# Altium integrated library EKG.IntLib: 40 symbols
Pins are listed as number, name and electrical type; pins without a type are passive.

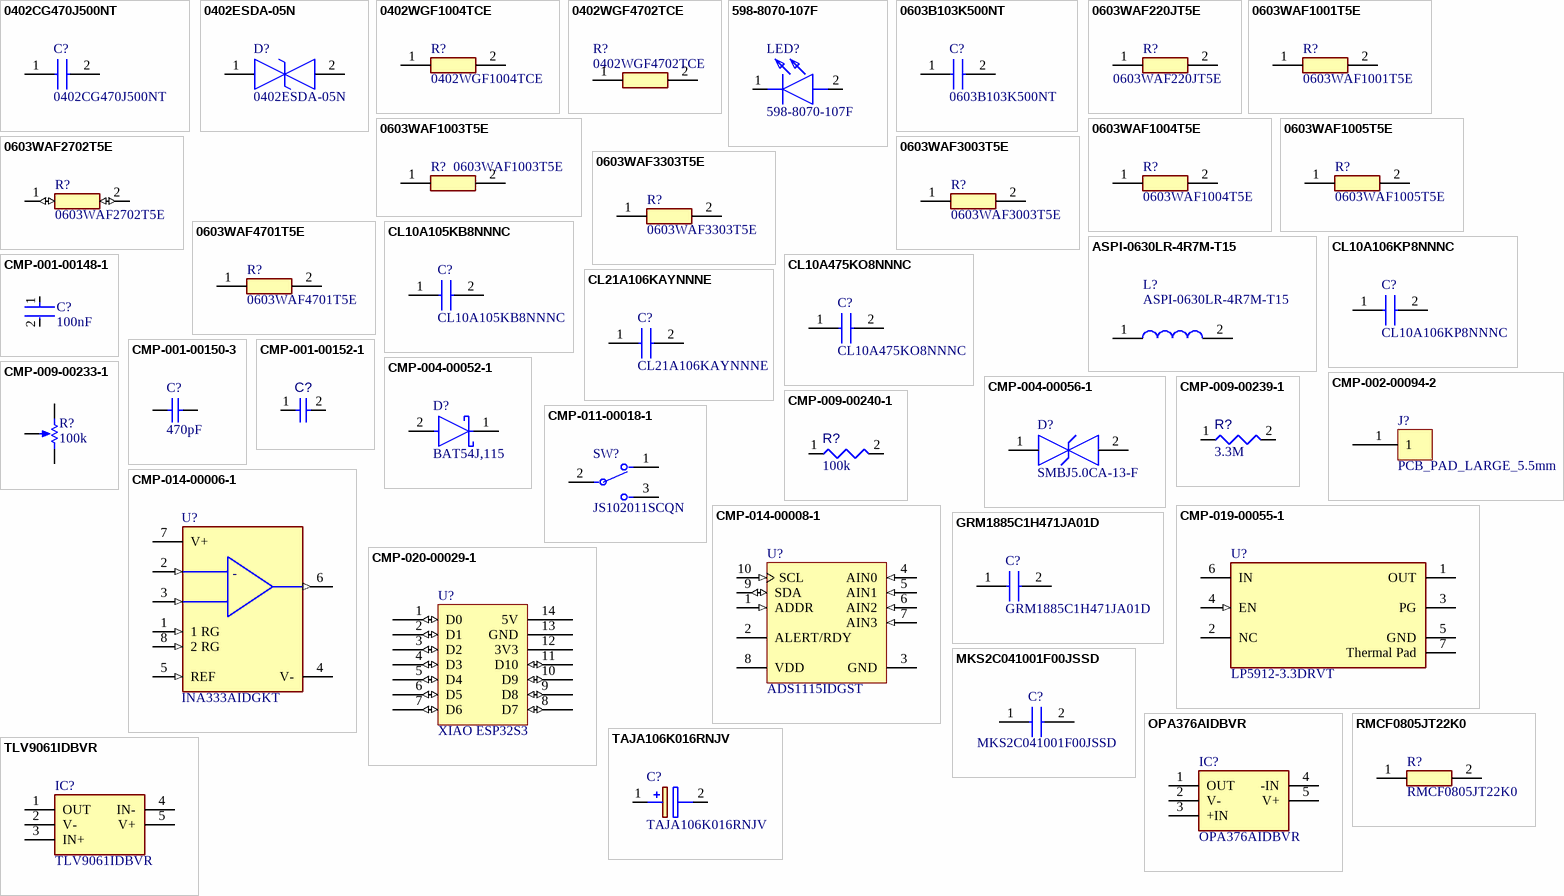
[diagram p0: symbols 0402CG470J500NT to TLV9061IDBVR]

## 0402CG470J500NT
designator C?
Capacitor; Manufacturer_Name: Guangdong Fenghua Advanced Tech; Datasheet Link: https://datasheet.lcsc.com/szlcsc/Guangdong-Fenghua-Advanced-Tech-0402CG470J500NT_C1567.pdf; Height: 0.55mm; Manufacturer_Part_Number: 0402CG470J500NT
footprint CAPC1005X55N
pins: 1, 2

## 0402ESDA-05N
designator D?
TVS Diode (Bi-directional); Manufacturer_Name: Bourne Semicon; Datasheet Link: https://datasheet.lcsc.com/szlcsc/1811061308_Bourne-Semicon-Shenzhen-0402ESDA-05N_C316049.pdf; Height: 0.6mm; Manufacturer_Part_Number: 0402ESDA-05N
footprint DIONC1005X60N
pins: 1, 2

## 0402WGF1004TCE
designator R?
Resistor; Manufacturer_Name: ROYALOHM; Datasheet Link: https://www.mouser.ca/datasheet/2/1365/1-3044649.pdf; Height: 0.4mm; Manufacturer_Part_Number: 0402WGF1004TCE; Mouser Part Number: 303-0402WGF1004TCE; Mouser Price/Stock: https://www.mouser.co.uk/ProductDetail/Royalohm/0402WGF1004TCE?qs=e8oIoAS2J1Sm8qYhjADD%252Bg%3D%3D
footprint RESC1005X40N
pins: 1, 2

## 0402WGF4702TCE
designator R?
Resistor; Manufacturer_Name: UNI-ROYAL(Uniroyal Elec); Datasheet Link: https://datasheet.lcsc.com/szlcsc/Uniroyal-Elec-0402WGF4702TCE_C25792.pdf; Height: 0.4mm; Manufacturer_Part_Number: 0402WGF4702TCE
footprint RESC1005X40N
pins: 1, 2

## 598-8070-107F
designator LED?
LED; Manufacturer_Name: Dialight; Datasheet Link: https://www.mouser.in/datasheet/2/109/Dialight_CBI_data_598_0603_Apr2018-2944350.pdf; Height: 0.8mm; Manufacturer_Part_Number: 598-8070-107F; Mouser Part Number: 645-598-8070-107F; Mouser Price/Stock: https://www.mouser.co.uk/ProductDetail/Dialight/598-8070-107F?qs=7JStj%2FjQ2SEP6f6GzqcocA%3D%3D; Arrow Part Number: 598-8070-107F; Arrow Price/Stock: https://www.arrow.com/en/products/598-8070-107f/dialight?region=nac
footprint 5988070107F
pins: 1 K, 2 A

## 0603B103K500NT
designator C?
Capacitor; Manufacturer_Name: Fenghua Advanced Technology (Holding) CO.; Datasheet Link: https://www.datasheets360.com/pdf/5043620394403009653; Height: 0.9mm; Manufacturer_Part_Number: 0603B103K500NT
footprint CAPC1608X90N
pins: 1, 2

## 0603WAF220JT5E
designator R?
Resistor; Manufacturer_Name: UNI-ROYAL(Uniroyal Elec); Datasheet Link: https://www.lcsc.com/datasheet/lcsc_datasheet_2206010100_UNI-ROYAL-Uniroyal-Elec-0603WAF220JT5E_C23345.pdf; Height: 0.55mm; Manufacturer_Part_Number: 0603WAF220JT5E
footprint RESC1608X55N
pins: 1, 2

## 0603WAF1001T5E
designator R?
Resistor; Manufacturer_Name: UNI-ROYAL(Uniroyal Elec); Datasheet Link: https://datasheet.lcsc.com/szlcsc/Uniroyal-Elec-0603WAF1001T5E_C21190.pdf; Height: 0.55mm; Manufacturer_Part_Number: 0603WAF1001T5E
footprint RESC1608X55N
pins: 1, 2

## 0603WAF1003T5E
designator R?
Resistor; Manufacturer_Name: UNI-ROYAL(Uniroyal Elec); Datasheet Link: https://datasheet.lcsc.com/szlcsc/Uniroyal-Elec-0603WAF1003T5E_C25803.pdf; Height: 0.55mm; Manufacturer_Part_Number: 0603WAF1003T5E
footprint RESC1608X55N
pins: 1, 2

## 0603WAF1004T5E
designator R?
Resistor; Manufacturer_Name: ROYALOHM; Datasheet Link: https://eu.mouser.com/datasheet/3/5925/1/1.pdf; Height: 0.55mm; Manufacturer_Part_Number: 0603WAF1004T5E; Mouser Part Number: 303-0603WAF1004T5E; Mouser Price/Stock: https://www.mouser.co.uk/ProductDetail/Royalohm/0603WAF1004T5E?qs=e8oIoAS2J1ROidUp2W57ZQ%3D%3D
footprint RESC1608X55N
pins: 1, 2

## 0603WAF1005T5E
designator R?
Resistor; Manufacturer_Name: ROYALOHM; Datasheet Link: https://eu.mouser.com/datasheet/3/5925/1/1.pdf; Height: 0.55mm; Manufacturer_Part_Number: 0603WAF1005T5E; Mouser Part Number: 303-0603WAF1005T5E; Mouser Price/Stock: https://www.mouser.co.uk/ProductDetail/Royalohm/0603WAF1005T5E?qs=e8oIoAS2J1TtIpBlPWLC5w%3D%3D
footprint RESC1608X55N
pins: 1, 2

## 0603WAF2702T5E
designator R?
Resistor; Manufacturer_Name: UNI-ROYAL(Uniroyal Elec); Datasheet Link: https://datasheet.lcsc.com/lcsc/2110252130_UNI-ROYAL-Uniroyal-Elec-0603WAF2702T5E_C22967.pdf; Height: 0.55mm; Manufacturer_Part_Number: 0603WAF2702T5E
footprint RESC1608X55N
pins: 1 (io), 2 (io)

## 0603WAF3003T5E
designator R?
Resistor; Manufacturer_Name: ROYALOHM; Datasheet Link: https://www.mouser.de/datasheet/2/1365/1-3044649.pdf; Height: 0.55mm; Manufacturer_Part_Number: 0603WAF3003T5E
footprint RESC1608X55N
pins: 1, 2

## 0603WAF3303T5E
designator R?
Resistor; Manufacturer_Name: Uniroyal Elec; Datasheet Link: https://datasheet.lcsc.com/szlcsc/Uniroyal-Elec-0603WAF3303T5E_C23137.pdf; Height: 0.55mm; Manufacturer_Part_Number: 0603WAF3303T5E
footprint RESC1608X55N
pins: 1, 2

## 0603WAF4701T5E
designator R?
Resistor; Manufacturer_Name: UNI-ROYAL(Uniroyal Elec); Datasheet Link: https://datasheet.lcsc.com/szlcsc/Uniroyal-Elec-0603WAF4701T5E_C23162.pdf; Height: 0.55mm; Manufacturer_Part_Number: 0603WAF4701T5E
footprint RESC1608X55N
pins: 1, 2

## ASPI-0630LR-4R7M-T15
designator L?
Inductor; Manufacturer_Name: ABRACON; Datasheet Link: https://abracon.com/Magnetics/power/ASPI-0630LR.pdf; Manufacturer_Part_Number: ASPI-0630LR-4R7M-T15; Mouser Part Number: 815-ASPI0630LR4R7T15; Mouser Price/Stock: https://www.mouser.co.uk/ProductDetail/ABRACON/ASPI-0630LR-4R7M-T15?qs=bWAYEm3xoCYVuRmkzS1c6A%3D%3D; Arrow Part Number: ASPI-0630LR-4R7M-T15; Arrow Price/Stock: https://www.arrow.com/en/products/aspi-0630lr-4r7m-t15/abracon?utm_currency=USD&region=nac
footprint ASPI-0630LR
pins: 1, 2

## CL10A105KB8NNNC
designator C?
Capacitor; Manufacturer_Name: SAMSUNG; Datasheet Link: https://datasheet.datasheetarchive.com/originals/distributors/Datasheets-DGA10/2411562.pdf; Height: 0.9mm; Manufacturer_Part_Number: CL10A105KB8NNNC; Mouser Part Number: 187-CL10A105KB8NNNC; Mouser Price/Stock: https://www.mouser.co.uk/ProductDetail/Samsung-Electro-Mechanics/CL10A105KB8NNNC?qs=ktYoCbbtCSJz4pFCLWXd5g%3D%3D; Arrow Part Number: CL10A105KB8NNNC; Arrow Price/Stock: https://www.arrow.com/en/products/cl10a105kb8nnnc/samsung-electro-mechanics.html?utm_currency=USD&region=nac
footprint CAPC1608X90N
pins: 1, 2

## CL10A106KP8NNNC
designator C?
Capacitor; Manufacturer_Name: SAMSUNG; Datasheet Link: https://datasheet.datasheetarchive.com/originals/distributors/Datasheets-DGA10/2415998.pdf; Height: 0.9mm; Manufacturer_Part_Number: CL10A106KP8NNNC; Mouser Part Number: 187-CL10A106KP8NNNC; Mouser Price/Stock: https://www.mouser.co.uk/ProductDetail/Samsung-Electro-Mechanics/CL10A106KP8NNNC?qs=X6jEic%2FHinAlyfRHj7fKwg%3D%3D; Arrow Part Number: CL10A106KP8NNNC; Arrow Price/Stock: https://www.arrow.com/en/products/cl10a106kp8nnnc/samsung-electro-mechanics.html?utm_currency=USD&region=europe
footprint CAPC1608X90N
pins: 1, 2

## CL10A475KO8NNNC
designator C?
Capacitor; Manufacturer_Name: SAMSUNG; Datasheet Link: https://rs.componentsearchengine.com/Datasheets/2/CL10A475KO8NNNC.pdf; Height: 0.9mm; Manufacturer_Part_Number: CL10A475KO8NNNC; Mouser Part Number: 187-CL10A475KO8NNNC; Mouser Price/Stock: https://www.mouser.co.uk/ProductDetail/Samsung-Electro-Mechanics/CL10A475KO8NNNC?qs=X6jEic%2FHinAbIjmLnFfqqQ%3D%3D; Arrow Part Number: CL10A475KO8NNNC; Arrow Price/Stock: https://www.arrow.com/en/products/cl10a475ko8nnnc/samsung-electro-mechanics.html?utm_currency=USD&region=nac
footprint CAPC1608X90N
pins: 1, 2

## CL21A106KAYNNNE
designator C?
Capacitor; Manufacturer_Name: SAMSUNG; Datasheet Link: https://datasheet.datasheetarchive.com/originals/distributors/Datasheets_SAMA/6a45835c9b7400e9b49c55c38a8ff4a2.pdf; Height: 1.45mm; Manufacturer_Part_Number: CL21A106KAYNNNE; Mouser Part Number: 187-CL21A106KAYNNNE; Mouser Price/Stock: https://www.mouser.co.uk/ProductDetail/Samsung-Electro-Mechanics/CL21A106KAYNNNE?qs=yOVawPpwOwmTXAd4dJtNjA%3D%3D; Arrow Part Number: CL21A106KAYNNNE; Arrow Price/Stock: https://www.arrow.com/en/products/cl21a106kaynnne/samsung-electro-mechanics.html?utm_currency=USD&region=nac
footprint CAPC2012X145N
pins: 1, 2

## CMP-001-00148-1
designator C?, comment value 100nF  (hidden comment: CC0603KRX7R9BB104)
Multilayer Ceramic Capacitor, CC Series, 0.1 - F, - 10%, X7R, 50 V, 0603 [1608 Metric]; Manufacturer: Yageo Group; Voltage Rating: 50V; Mounting Technology: Surface Mount; Tolerance: 10%; Case/Package: 0603; Max Operating Temperature: 125°C; Min Operating Temperature: -55°C; Pins: 2; Lead Free: Lead Free; Case Code (Metric): 1608; Width: 800µm; Termination: SMD/SMT; Depth: 800µm; RoHS: Compliant; Material: Ceramic; Dielectric: X7R; Schedule B: 8532240020, 8532240020; Country of Origin: Mainland China, Taiwan; Lifecycle Status: Production; Radiation Hardening: No; Case Code (Imperial): 0603; Height: 800µm; Number of Terminals: 2; China RoHS: Compliant; Voltage Rating (DC): 50V; Export Control Classification Number (ECCN) Code: EAR99; Halogen Free: Halogen Free; Thickness: 889µm; Voltage: 50V; Length: 1.6mm; Harmonized Tariff Schedule (HTS) Code: 8532.24.00.20; REACH SVHC: Unaffected; Introduction Date: 2005-08-18; Dielectric Material: Ceramic; Manufacturer Part Number: CC0603KRX7R9BB104; Component Type: Capacitors
footprint FP-CC0603-DA-IPC_B
footprint FP-CC0603-DA-IPC_C
footprint FP-CC0603-DA-MFG
footprint FP-CC0603-DA-IPC_A
pins: 1, 2

## CMP-001-00150-3
designator C?, comment value 470pF  (hidden comment: 0402B471K500NT)
50V 470pF X7R ±10% 0402 Multilayer Ceramic Capacitors MLCC - SMD/SMT ROHS; Manufacturer: Fenghua Electronics; Voltage Rating (DC): 50V; Mounting Technology: Surface Mount; Max Operating Temperature: 125°C; Lifecycle Status: Production; RoHS: Compliant; Dielectric Material: Ceramic; Length: 1mm; Width: 500µm; Case/Package: 0402; Height: 500µm; Number of Terminals: 2; REACH SVHC: Unaffected; Min Operating Temperature: -55°C; Manufacturer Part Number: 0402B471K500NT; Component Type: Capacitors
footprint Copy of KGM05DR50J226MH (Multilayer Ceramic Capacitors MLCC - SMD/SMT 6.3V 22uF X5R 0402 2 0%)
pins: 1, 2
1 alternate drawing of the same symbol

## CMP-001-00152-1
designator C?, comment TCC0402COG220J500AT  (value not drawn)
50V 22pF C0G ±5% 0402 Multilayer Ceramic Capacitors MLCC - SMD/SMT ROHS; Manufacturer: CCTC; Manufacturer Part Number: TCC0402COG220J500AT; Component Type: Capacitors
footprint TCC0402COG220J500AT (Multilayer Ceramic Capacitors MLCC - SMD/SMT 6.3V 22uF X5R 0402 2 0%)
pins: 1, 2

## CMP-002-00094-2
designator J?, comment PCB_PAD_LARGE_5.5mm
Large PCB pad; Component Type: Connectors
footprint PCB_MOTOR_PAD-Footprint-1
pins: 1

## CMP-004-00052-1
designator D?, comment BAT54J,115
BAT54 Series 30 V 0.2 A Surfacec Mount Schottky Diode - SOD-323F; Manufacturer Lifecycle Status: RELEASED FOR SUPPLY; Manufacturer: Nexperia; Max Reverse Voltage (DC): 30V; Max Output current: 200mA; Max Power Dissipation: 550mW; Forward Voltage: 240mV; Peak Non-Repetitive Surge Current: 600mA; Element Configuration: Single; Reverse Standoff Voltage: 25V; Value: 10pF; Max Junction Temperature (Tj): 150°C; Max Reverse Leakage Current: 2µA; Number of Elements: 1; RoHS: Compliant; Lead Free: Lead Free; Export Control Classification Number (ECCN) Code: EAR99; Forward Current: 200mA; Height: 800µm; REACH SVHC: Yes; Reverse Voltage: 30V; Max Repetitive Reverse Voltage (Vrrm): 30V; Radiation Hardening: No; Pins: 2; Max Surge Current: 600mA; Schedule B: 8541100070, 8541100070; Contact Plating: Tin; Mounting Technology: Surface Mount; Harmonized Tariff Schedule (HTS) Code: 8541.10.00.70; Peak Reverse Current: 2µA; Lifecycle Status: Production; China RoHS: Compliant; Average Rectified Current: 200mA; Ambient Temperature Range High: 150°C; Number of Terminals: 2; Max Operating Temperature: 150°C; Max Forward Surge Current (Ifsm): 600mA; Introduction Date: 2007-03-09; Country of Origin: Mainland China, Malaysia; Min Operating Temperature: -65°C; Manufacturer Part Number: BAT54J,115; Component Type: Diodes
footprint FP-SOD323F-MFG
pins: 1 C, 2 A

## CMP-004-00056-1
designator D?, comment SMBJ5.0CA-13-F
SMBJ5.0CA Series 600 W 5.0 V Surface Mount Bi-Directional TVS Diode - DO-214AA; Manufacturer: Diodes Inc.; Max Breakdown Voltage: 7.23V; Test Current: 10mA; Number of Channels: 1; Reverse Breakdown Voltage: 6.4V; Power Dissipation: 600W; Voltage Rating (DC): 5V; Breakdown Voltage: 6.8V; Max Output current: 65.2A; Clamping Voltage: 9.2V; Polarity: Bidirectional; Max Junction Temperature (Tj): 150°C; Max Reverse Leakage Current: 1.6mA; Value: 1nF; Max Power Dissipation: 5W; Element Configuration: Single; Schedule B: 8541100050, 8541100050; Packaging: Cut Tape; Mounting Technology: Surface Mount; Min Breakdown Voltage: 6.4V; Number of Elements: 1; Width: 3.9mm; Max Surge Current: 65.2A; Height: 2.5mm; Radiation Hardening: No; Length: 4.57mm; Pins: 2; RoHS: Compliant; Peak Pulse Power: 600W; Min Operating Temperature: -55°C; Case/Package: SMB; Number of Terminals: 2; Max Operating Temperature: 150°C; China RoHS: Non-Compliant; Leakage Current: 1.6mA; Reverse Standoff Voltage: 5V; Peak Pulse Current: 65.2A; REACH SVHC: Affected; Lead Free: Contains Lead; Termination: SMD/SMT; Lifecycle Status: Production; Direction: Bidirectional; Power Rating: 600W; Working Voltage: 5V; Manufacturer Part Number: SMBJ5.0CA-13-F; Component Type: Diodes
footprint FP-SMB-CA-MFG
pins: 1, 2

## CMP-009-00233-1
designator R?, comment value 100k  (hidden comment: 3266W-1-104LF)
Trimmer, Cermet, Rest 100 Kilohms, Pcb, Pwr-rtg 0.25W, Dim 0.264INLX0.177INWX0.285INH; Manufacturer: Bourns; Insulation Resistance: 1GΩ; Lead Length: 4.88mm; Lead Diameter: 460µm; Voltage Rating: 300V; Max Power Dissipation: 250mW; Pitch: 2.54mm; Number of Turns: 12; Tolerance: 10%; Temperature Coefficient: 100ppm/°C; Composition: Cermet; Number of Terminals: 3; Military Standard: Not; REACH SVHC: Affected; Thickness: 5.59mm; Taper: Linear; Max Operating Temperature: 125°C; Contact Plating: Tin; Depth: 4.5mm; RoHS: Compliant; Min Operating Temperature: -55°C; Pins: 3; Termination: Pin; Height: 7.24mm; Schedule B: 8533400080, 8533400080; Working Voltage: 300V; Voltage Rating (AC): 300V; Voltage Rating (DC): 300V; Width: 4.5mm; Radiation Hardening: No; Lifecycle Status: Production; Weight: 425.242847mg; Type: Potentiometer; Color: Blue; Length: 6.71mm; Power Rating: 250mW; Manufacturer Part Number: 3266W-1-104LF; Component Type: Resistors
footprint BOUR-3266W-3_V (THD, 3-Leads, Body 6.6x4.69mm, Pitch 2.54mm)
pins: 1 CCW, 2 WIPER, 3 CW

## CMP-009-00239-1
designator R?, comment value 3.3M  (hidden comment: 0603WAF3304T5E)
Res Thick Film 0603 3.3M Ohm 1% 0.1W(1/10W) ±100ppm/C Pad SMD T/R; Manufacturer: Royal Ohm; Working Voltage: 75V; Power Rating: 100mW; Temperature Coefficient: 100ppm/°C; Lifecycle Status: Production; REACH SVHC: Unaffected; Case/Package: 0603; Number of Terminals: 2; Mounting Technology: Surface Mount; Width: 800µm; RoHS: Compliant; China RoHS: Non-Compliant; Length: 1.6mm; Tolerance: 1%; Max Operating Temperature: 155°C; Height: 450µm; Min Operating Temperature: -55°C; Manufacturer Part Number: 0603WAF3304T5E; Component Type: Resistors
footprint 0603WAF3304T5E
pins: 1, 2
1 alternate drawing of the same symbol

## CMP-009-00240-1
designator R?, comment value 100k  (hidden comment: 0603WAF1003T5E)
Fixed Resistor, Metal Glaze/Thick Film, 0.1W, 100000ohm, 75V, 1% +/-Tol, Surface Mount, 0603; Manufacturer: Uniroyal; Power Rating: 100mW; Working Voltage: 50V; Temperature Coefficient: 100ppm/°C; Harmonized Tariff Schedule (HTS) Code: 8533.21.00.30; REACH SVHC: Unaffected; Height: 450µm; Lifecycle Status: Production; RoHS: Compliant; Length: 1.6mm; Mounting Technology: Surface Mount; Tolerance: 1%; Width: 800µm; Case/Package: 0603; Min Operating Temperature: -55°C; Max Operating Temperature: 155°C; Export Control Classification Number (ECCN) Code: EAR99; Number of Terminals: 2; Manufacturer Part Number: 0603WAF1003T5E; Component Type: Resistors
footprint 0603WAF3304T5E
pins: 1, 2
1 alternate drawing of the same symbol

## CMP-011-00018-1
designator SW?, comment JS102011SCQN
Slide Switch, 2 Positions, SPDT, Latched, 0.3A, 6VDC, Solder Terminal, Surface Mount-straight; Manufacturer: C&K Components; Contact Resistance: 70mΩ; Number of Positions: 1; Actuator Length: 2.0066mm; Switch Travel: 2mm; Electrical Life: 5kcycles; Current Rating: 300mA; Actuator Material: Nylon; Switch Function: On-On; Insulation Resistance: 100MΩ; Voltage Rating (DC): 6V; Min Operating Temperature: -40°C; Radiation Hardening: No; Orientation: Straight; Throw Configuration: SPDT; Introduction Date: 2009-12-16; Housing Material: Nylon; Length: 8.5mm; Harmonized Tariff Schedule (HTS) Code: 8536.50.90.50; Country of Origin: Mainland China; Color: Black; Export Control Classification Number (ECCN) Code: EAR99; REACH SVHC: Unaffected; Case/Package: SMD/SMT; Contact Current Rating: 300mA; Contact Plating: Silver; Life (Cycles): 5kcycles; Packaging: Tape and Reel; Mounting Technology: Surface Mount; Termination: Solder; RoHS: Compliant; Max Current Rating: 300mA; Height: 3.5mm; Terminal Material: Brass; Max Voltage Rating (DC): 6V; Max Operating Temperature: 85°C; Lifecycle Status: Production; Depth: 7.5mm; Manufacturer Part Number: JS102011SCQN; Component Type: Switches
footprint FP-JS102011SCQN-MFG
pins: 1, 2 C, 3

## CMP-014-00006-1
designator U?, comment INA333AIDGKT
IC INST AMP 1 CIRCUIT 8VSSOP Instrumentation Amplifier 1 Circuit Rail-to-Rail 8-VSSOP; Manufacturer Lifecycle Status: ACTIVE; Manufacturer: Texas Instruments; Number of Amplifiers: 1; Operating Supply Current: 50µA; Max Junction Temperature (Tj): 150°C; Common Mode Rejection Ratio: 100dB; Max Dual Supply Voltage: 2.75V; Min Supply Voltage: 1.8V; Max Supply Voltage: 5.5V; Min Dual Supply Voltage: 900mV; Input Offset Voltage (Vos): 25µV; Output Current per Channel: 40mA; Gain Bandwidth Product: 150kHz; Max Supply Current: 75µA; Value: 100GΩ; Power Supply Rejection Ratio (PSRR): 120dB; Number of Elements: 3; Input Bias Current: 70pA; Slew Rate: 0.16V/µs; Voltage Gain: 60dB; Thickness: 970µm; Width: 3mm; Number of Circuits: 1; Quiescent Current: 50µA; Lead Free: Lead Free; Height: 0m; Max Operating Temperature: 125°C; REACH SVHC: Unaffected; Schedule B: 8542330000, 8542330000; Radiation Hardening: No; Length: 3mm; RoHS: Compliant; Number of Channels: 1; -3db Bandwidth: 150kHz; Nominal Supply Current: 50µA; Case/Package: VSSOP; Ambient Temperature Range High: 125°C; Bandwidth: 150kHz; Lifecycle Status: Production; Pins: 8; Min Operating Temperature: -40°C; Weight: 26.506804mg; Manufacturer Part Number: INA333AIDGKT; Component Type: Amplifiers
footprint FP-DGK0008A-IPC_B
footprint FP-DGK0008A-IPC_A
footprint FP-DGK0008A-IPC_C
footprint FP-DGK0008A-MFG
pins: 1 1 RG (in), 2 VIN- (in), 3 VIN+ (in), 4 V- (power), 5 REF (in), 6 VOUT (out), 7 V+ (power), 8 2 RG (in)
text: -

## CMP-014-00008-1
designator U?, comment ADS1115IDGST
4-Channel Single ADC Delta-Sigma 860sps 16-bit Serial 10-Pin VSSOP T/R; Manufacturer Lifecycle Status: ACTIVE; Manufacturer: Texas Instruments; Min Supply Voltage: 2V; Resolution: 2B; Number of A/D Converters: 1; Max Power Dissipation: 500µW; Nominal Supply Current: 150µA; Polarity: Bipolar; Max Supply Voltage: 5.5V; Interface: I2C; Power Dissipation: 900µW; Number of Bits: 16; Number of Channels: 4; Operating Supply Voltage: 3.3V; Integral Nonlinearity (INL): 1LSB; Termination: SMD/SMT; Case/Package: VSSOP; Width: 3mm; Contact Plating: Gold; REACH SVHC: No; Pins: 10; Number of Converters: 1; Max Operating Temperature: 125°C; Thickness: 1.02mm; Lead Free: Lead Free; Number of Elements: 1; Height: 1.07mm; Min Supply Voltage (DC): 2V; Lifecycle Status: Production; RoHS: Compliant; Conversion Rate: 860sps; Schedule B: 8542390000, 8542390000; Radiation Hardening: No; Supply Type: Single; Number of Inputs: 4; Sampling Rate: 860sps; Length: 3mm; Min Operating Temperature: -40°C; Max Supply Voltage (DC): 5.5V; Manufacturer Part Number: ADS1115IDGST; Component Type: Interface
footprint TI-DGS10_L (SOP, 10-Leads, Body 3x3mm, Pitch 0.5mm, IPC High Density)
footprint TI-DGS10_M (SOP, 10-Leads, Body 3x3mm, Pitch 0.5mm, IPC Low Density)
footprint TI-DGS10_N (SOP, 10-Leads, Body 3x3mm, Pitch 0.5mm, IPC Medium Density)
pins: 1 ADDR (in) "I2C slave address select", 2 ALERT/RDY (oc) "Digital comparator output or conversion ready", 3 GND (power) "Ground", 4 AIN0 (in) "Differential channel 1: Positive input or single-ended channel 1 input", 5 AIN1 (in) "Differential channel 1: Negative input or single-ended channel 2 input", 6 AIN2 (in) "Differential channel 2: Positive input or single-ended channel 3 input", 7 AIN3 (in) "Differential channel 2: Negative input or single-ended channel 4 input", 8 VDD (power) "Power supply: 2.0V to 5.5V", 9 SDA (io) "Serial data: Transmits and receives data", 10 SCL (in) "Serial clock input: Clocks data on SDA"

## CMP-019-00055-1
designator U?, comment LP5912-3.3DRVT
500mA 40dB@(100kHz) Fixed 3.3V Positive 6.5V DFN-6(2x2) Linear Voltage Regulators (LDO) ROHS; Manufacturer Lifecycle Status: ACTIVE; Manufacturer: Texas Instruments; Dropout Voltage: 950mV; Number of Regulators: 1; Quiescent Current: 30µA; Height: 800µm; Packaging: Cut Tape; Mounting Technology: Surface Mount; Output Voltage: 3.3V; Output Type: Fixed; Length: 2mm; Lead Free: Lead Free; Thickness: 750µm; Output Current: 500mA; Lifecycle Status: Production; Max Operating Temperature: 125°C; RoHS: Compliant; Min Operating Temperature: -40°C; Number of Channels: 1; Pins: 6; Width: 2mm; Schedule B: 8542390000, 8542390000; Manufacturer Part Number: LP5912-3.3DRVT; Component Type: Power Supply
footprint FP-DRV0006A-IPC_C
footprint FP-DRV0006A-MFG
footprint FP-DRV0006A-IPC_B
footprint FP-DRV0006A-IPC_A
pins: 1 OUT (power), 2 NC, 3 PG (oc), 4 EN (in), 5 GND (power), 6 IN (power), 7 Thermal Pad (power)

## CMP-020-00029-1
designator U?, comment XIAO ESP32S3
Manufacturer: Seeed Studio; Manufacturer Part Number: XIAO ESP32S3; Component Type: Processors
footprint XIAO ESP32S3-Footprint-1
pins: 1 D0 (io), 2 D1 (io), 3 D2 (io), 4 D3 (io), 5 D4 (io), 6 D5 (io), 7 D6 (io), 8 D7 (io), 9 D8 (io), 10 D9 (io), 11 D10 (io), 12 3V3 (power), 13 GND (power), 14 5V (power)

## GRM1885C1H471JA01D
designator C?
Capacitor; Manufacturer_Name: Murata Electronics; Datasheet Link: https://search.murata.co.jp/Ceramy/image/img/A01X/G101/ENG/GRM1885C1H471JA01-01A.pdf; Height: 0.9mm; Manufacturer_Part_Number: GRM1885C1H471JA01D; Mouser Part Number: 81-GRM39C471J50; Mouser Price/Stock: https://www.mouser.co.uk/ProductDetail/Murata-Electronics/GRM1885C1H471JA01D?qs=dDtGB%252BtNe6pvV5u0%2FOvNVA%3D%3D; Arrow Part Number: GRM1885C1H471JA01D; Arrow Price/Stock: https://www.arrow.com/en/products/grm1885c1h471ja01d/murata-manufacturing.html?utm_currency=USD&region=europe
footprint CAPC1608X90N
pins: 1, 2

## MKS2C041001F00JSSD
designator C?
Capacitor; Manufacturer_Name: WIMA; Datasheet Link: https://www.digikey.com/en/products/detail/wima/MKS2C041001F00JSSD/19251598; Height: 10mm; Manufacturer_Part_Number: MKS2C041001F00JSSD; Mouser Part Number: 505-MKS21.0/63/5; Mouser Price/Stock: https://www.mouser.co.uk/ProductDetail/WIMA/MKS2C041001F00JSSD?qs=ISKKXg98%252B1lQgUuGZjf9mQ%3D%3D; Arrow Part Number: MKS2C041001F00JSSD; Arrow Price/Stock: https://www.arrow.com/en/products/mks2c041001f00jssd/wima?region=europe
footprint MKS2C041001F00JSSD
pins: 1, 2

## OPA376AIDBVR
designator IC?
Integrated Circuit; Manufacturer_Name: Texas Instruments; Datasheet Link: http://www.ti.com/lit/gpn/OPA376; Height: 1.45mm; Manufacturer_Part_Number: OPA376AIDBVR; Mouser Part Number: 595-OPA376AIDBVR; Mouser Price/Stock: https://www.mouser.co.uk/ProductDetail/Texas-Instruments/OPA376AIDBVR?qs=xL7PkI2RoJ57GVtJklM7uw%3D%3D; Arrow Part Number: OPA376AIDBVR; Arrow Price/Stock: https://www.arrow.com/en/products/opa376aidbvr/texas-instruments.html?utm_currency=USD&region=europe
footprint SOT95P280X145-5N
pins: 1 OUT, 2 V-, 3 +IN, 4 -IN, 5 V+

## RMCF0805JT22K0
designator R?
Resistor; Manufacturer_Name: Stackpole Electronics; Datasheet Link: https://cs.seielect.com/catalog/SEI-RMCF_RMCP.pdf; Height: 0.65mm; Manufacturer_Part_Number: RMCF0805JT22K0; Mouser Part Number: 708-RMCF0805JT22K0; Mouser Price/Stock: https://www.mouser.co.uk/ProductDetail/SEI-Stackpole/RMCF0805JT22K0?qs=FESYatJ8odJj8AR7KQYlug%3D%3D; Arrow Part Number: RMCF0805JT22K0; Arrow Price/Stock: https://www.arrow.com/en/products/rmcf0805jt22k0/stackpole-electronics?region=nac
footprint RESC2012X65N
pins: 1, 2

## TAJA106K016RNJV
designator C?
Capacitor Polarised; Manufacturer_Name: Kyocera AVX; Datasheet Link: http://www.farnell.com/datasheets/1680476.pdf; Height: 1.8mm; Manufacturer_Part_Number: TAJA106K016RNJV; Mouser Part Number: 581-TAJA106K016RNJV; Mouser Price/Stock: https://www.mouser.co.uk/ProductDetail/KYOCERA-AVX/TAJA106K016RNJV?qs=X421pCAdHWe2u1fVMeO6XQ%3D%3D; Arrow Part Number: TAJA106K016RNJV; Arrow Price/Stock: https://www.arrow.com/en/products/taja106k016rnjv/avx?utm_currency=USD&region=nac
footprint CAPPM3216X180N
pins: 1 +, 2 -

## TLV9061IDBVR
designator IC?
Integrated Circuit; Manufacturer_Name: Texas Instruments; Datasheet Link: http://www.ti.com/lit/gpn/tlv9061; Height: 1.45mm; Manufacturer_Part_Number: TLV9061IDBVR; Mouser Part Number: 595-TLV9061IDBVR; Mouser Price/Stock: https://www.mouser.co.uk/ProductDetail/Texas-Instruments/TLV9061IDBVR?qs=w%2Fv1CP2dgqpra2GA6pq5aQ%3D%3D; Arrow Part Number: TLV9061IDBVR; Arrow Price/Stock: https://www.arrow.com/en/products/tlv9061idbvr/texas-instruments?utm_currency=USD&region=nac
footprint SOT95P280X145-5N
pins: 1 OUT, 2 V-, 3 IN+, 4 IN-, 5 V+